# Altium footprint library WR-MJ.PcbLib: 84 footprints (part 3 of 6)
Each footprint in its own frame and in the unit in brackets; x right, y up, seen from the top. Pads: shape width x height; smd on the part's side, far side on the other; paste and mask are expansions set on the pad; w line width, h text height; cw(c..) or ccw(c..) is an arc to the next point about the centre after c.
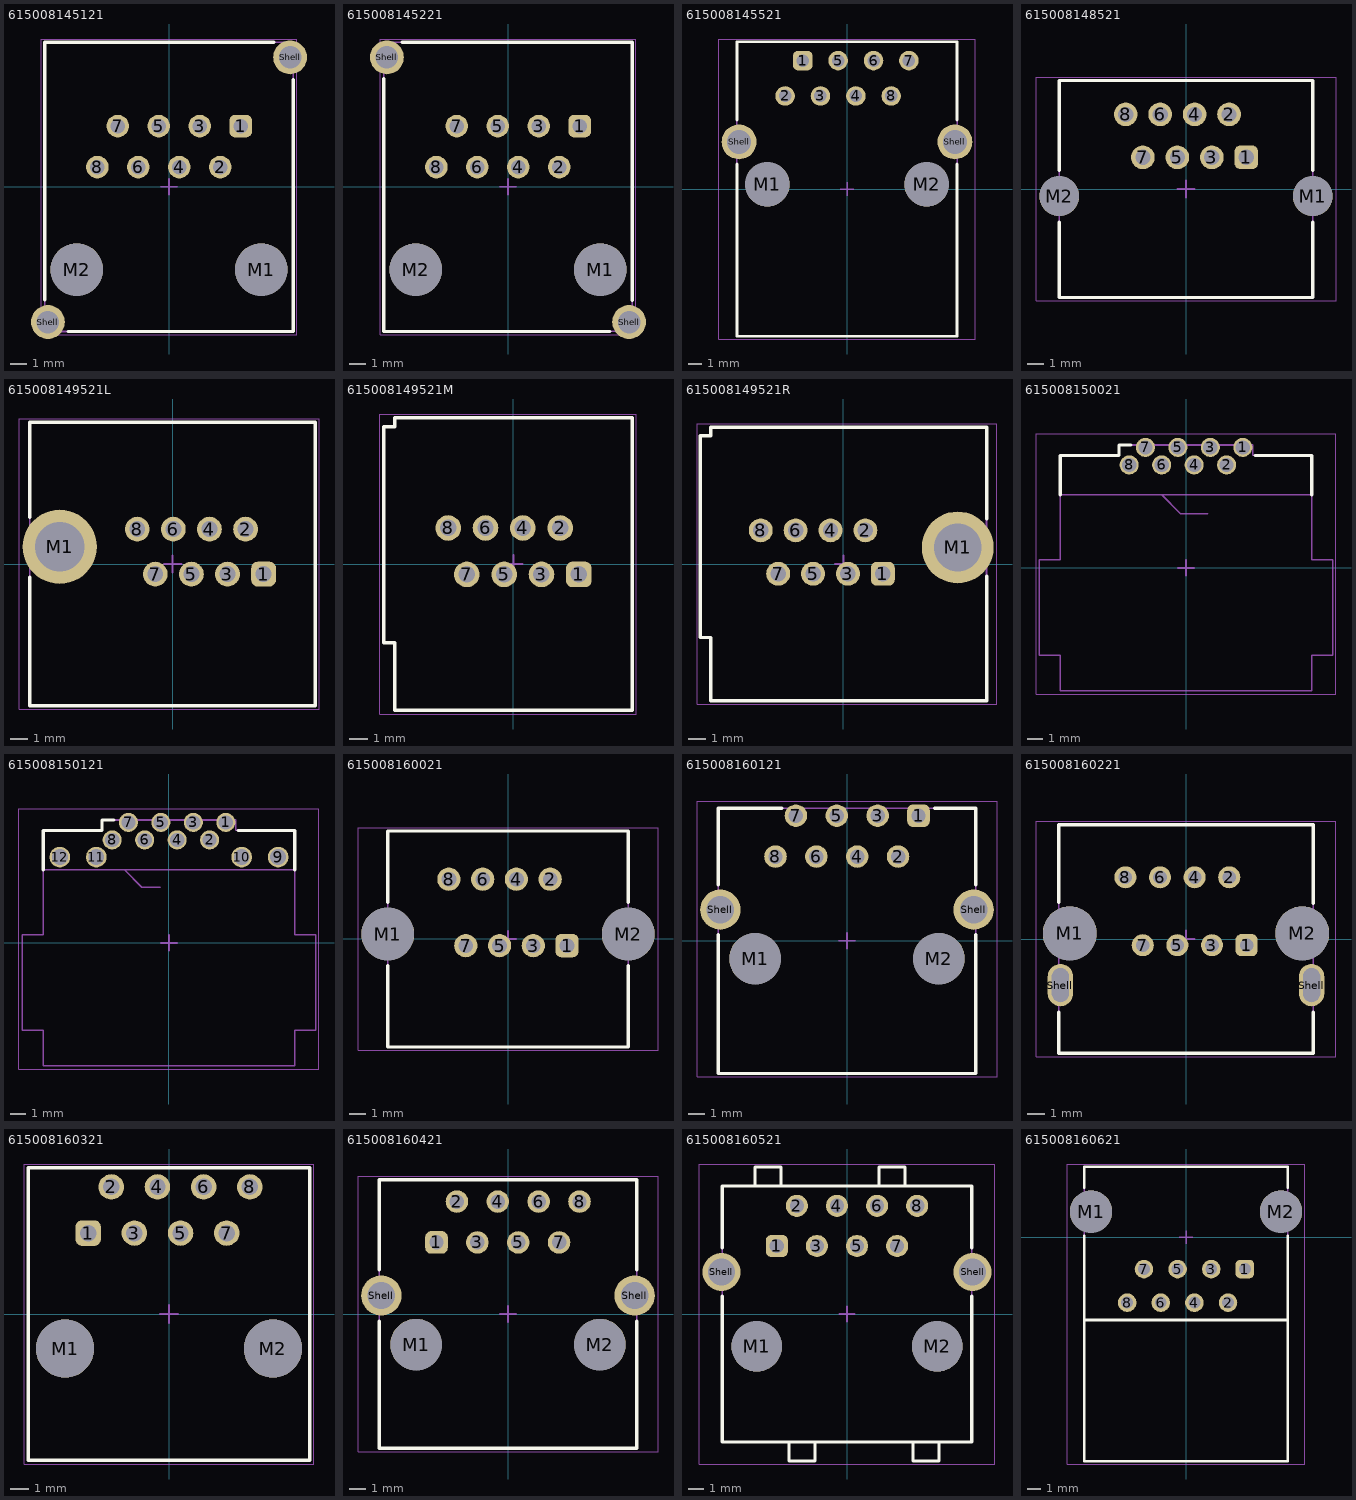
[diagram p2: the footprints below, top view; thin cyan lines are the x and y axes]

## 615008145121 [mm] "Modular Jack 45deg Entry Shielded 8P8C Standard & Reverse Metal Post Trail"
height 20.9
pads (12):
  rrect50% 1.4x1.4 hole 0.9: 1(4.44,3.765)
  round 1.4 hole 0.9: 2(3.175,1.225) 3(1.905,3.765) 4(0.635,1.225) 5(-0.635,3.765) 6(-1.905,1.225) 7(-3.175,3.765) 8(-4.44,1.225)
  round 3.25 hole 3.25 unplated: M1(5.715,-5.125) M2(-5.715,-5.125)
  round 2.1 hole 1.4: Shell(-7.5,-8.375) Shell(7.5,8.025)
Top Overlay:
  lines w0.2: -7.7,-7 -7.7,8.96 6.5,8.96 ; -6.25,-8.959 7.7,-8.959 7.7,6.65
Top Assembly:
  lines w0.1: -7.7,-8.959 7.7,-8.959 7.7,8.96 -7.7,8.96 -7.7,-8.959
Top Designator:
  text ".Designator" at -3.647,-0.357 h1
Top Courtyard:
  lines w0.05: -7.9,-9.159 7.9,-9.159 7.9,9.159 -7.9,9.159 -7.9,-9.159
Top Component Center:
  lines w0.1: -0.5,0 0.5,0 ; 0,-0.5 0,0.5
3D body "615008145121.stp": height 21.52, standoff -3.58, extent -7.7,-8.959 7.7,8.96

## 615008145221 [mm] "Modular Jack 45deg Entry Shielded 8P8C Standard & Reverse Metal Post Trail"
height 20.9
pads (12):
  rrect50% 1.4x1.4 hole 0.9: 1(4.44,3.762)
  round 1.4 hole 0.9: 2(3.175,1.222) 3(1.905,3.762) 4(0.635,1.222) 5(-0.635,3.762) 6(-1.905,1.222) 7(-3.175,3.762) 8(-4.44,1.222)
  round 3.25 hole 3.25 unplated: M1(5.715,-5.128) M2(-5.715,-5.128)
  round 2.1 hole 1.4: Shell(-7.5,8.022) Shell(7.5,-8.378)
Top Overlay:
  lines w0.2: -7.7,6.7 -7.7,-8.962 6.3,-8.962 ; -6.55,8.957 7.7,8.957 7.7,-7.05
Top Assembly:
  lines w0.1: -7.7,-8.957 7.7,-8.957 7.7,8.957 -7.7,8.957 -7.7,-8.957
Top Designator:
  text ".Designator" at -3.647,-0.357 h1
Top Courtyard:
  lines w0.05: -7.9,-9.157 7.9,-9.157 7.9,9.157 -7.9,9.157 -7.9,-9.157
Top Component Center:
  lines w0.1: -0.5,0 0.5,0 ; 0,-0.5 0,0.5
3D body "615008145221.stp": height 21.52, standoff -3.58, extent -7.7,-8.957 7.7,8.957

## 615008145521 [mm] "Modular Jack Horizontal Shielded with EMI Panel Finger 8P8C CAT 5e Tab Down"
height 13.6
pads (12):
  rrect50% 1.4x1.4 hole 0.9: 1(-3.175,9.22)
  round 1.4 hole 0.9: 2(-4.445,6.68) 3(-1.905,6.68) 4(0.635,6.68) 5(-0.635,9.22) 6(1.905,9.22) 7(4.445,9.22) 8(3.175,6.68)
  round 3.2 hole 3.2 unplated: M1(-5.715,0.33) M2(5.715,0.33)
  round 2.5 hole 1.7: Shell(-7.75,3.38) Shell(7.75,3.38)
Top Overlay:
  lines w0.2: -7.9,1.8 -7.9,-10.57 7.9,-10.57 7.9,1.8 ; -7.9,4.95 -7.9,10.57 7.9,10.57 7.9,4.95
Top Assembly:
  lines w0.1: -7.9,-10.57 7.9,-10.57 7.9,10.57 -7.9,10.57 -7.9,-10.57
Top Designator:
  text ".Designator" at -3.647,-0.357 h1
Top Courtyard:
  lines w0.05: -9.2,-10.77 -9.2,10.77 9.2,10.77 9.2,-10.77 -9.2,-10.77
Top Component Center:
  lines w0.1: -0.5,0 0.5,0 ; 0,-0.5 0,0.5
3D body "615008145521 (rev1).stp": height 15.85, standoff -3.3, extent -7.9,-10.57 7.9,10.57

## 615008148521 [mm] "Modular Jack Horizontal Plastic 8P8C Tab Up"
height 14.5
pads (10):
  rrect50% 1.4x1.4 hole 0.9: 1(3.57,1.875)
  round 1.4 hole 0.9: 2(2.55,4.415) 3(1.53,1.875) 4(0.51,4.415) 5(-0.51,1.875) 6(-1.53,4.415) 7(-2.55,1.875) 8(-3.57,4.415)
  round 2.36 hole 2.36 unplated: M1(7.5,-0.425) M2(-7.5,-0.425)
Top Overlay:
  lines w0.2: -7.5,-1.95 -7.5,-6.425 7.5,-6.425 7.5,-1.95 ; -7.5,1.1 -7.5,6.425 7.5,6.425 7.5,1.1
Top Assembly:
  lines w0.1: -7.5,-6.425 -7.5,6.425 7.5,6.425 7.5,-6.425 -7.5,-6.425
Top Designator:
  text ".Designator" at -3.647,-0.357 h1
Top Courtyard:
  lines w0.05: -8.88,-6.625 8.88,-6.625 8.88,6.625 -8.88,6.625 -8.88,-6.625
Top Component Center:
  lines w0.1: -0.5,0 0.5,0 ; 0,-0.5 0,0.5
3D body "615008148521.stp": height 14.55, standoff -3.25, extent -8.75,-6.425 8.75,6.425

## 615008149521L [mm] "Modular Jack Horizontal Plastic 8P8C Assembly Tab Up"
height 15.4
pads (9):
  rrect50% 1.4x1.4 hole 0.9: 1(5.14,-0.57)
  round 1.4 hole 0.9: 2(4.12,1.97) 3(3.1,-0.57) 4(2.08,1.97) 5(1.06,-0.57) 6(0.04,1.97) 7(-0.98,-0.57) 8(-2,1.97)
  round 4.2 hole 2.8: M1(-6.38,0.97)
Top Overlay:
  lines w0.2: -8.07,-0.75 -8.07,-8 8.07,-8 8.07,8 -8.07,8 -8.07,2.65
Top Assembly:
  lines w0.1: -8.07,-8 -8.07,8 8.07,8 8.07,-8 -8.07,-8
Top Designator:
  text ".Designator" at -3.647,-0.357 h1
Top Courtyard:
  lines w0.05: -8.68,-8.2 -8.68,8.2 8.27,8.2 8.27,-8.2 -8.68,-8.2
Top Component Center:
  lines w0.1: -0.5,0 0.5,0 ; 0,-0.5 0,0.5
3D body "615008149521L.stp": height 15.5, standoff -3.98, extent -8.07,-8 8.07,8

## 615008149521M [mm] "Modular Jack Horizontal Plastic 8P8C Assembly Tab Up"
height 15.4
pads (8):
  rrect50% 1.4x1.4 hole 0.9: 1(3.57,-0.57)
  round 1.4 hole 0.9: 2(2.55,1.97) 3(1.53,-0.57) 4(0.51,1.97) 5(-0.51,-0.57) 6(-1.53,1.97) 7(-2.55,-0.57) 8(-3.57,1.97)
Top Overlay:
  lines w0.2: -7.1,-4.3 -6.5,-4.3 -6.5,-8 6.5,-8 6.5,8 -6.5,8 -6.5,7.5 -7.1,7.5 -7.1,-4.3
Top Assembly:
  lines w0.1: -7.1,-4.3 -7.1,7.5 -6.5,7.5 -6.5,8 6.5,8 6.5,-8 -6.5,-8 -6.5,-4.3 -7.1,-4.3
Top Designator:
  text ".Designator" at -3.647,-0.357 h1
Top Courtyard:
  lines w0.05: -7.3,-8.2 -7.3,8.2 6.7,8.2 6.7,-8.2 -7.3,-8.2
Top Component Center:
  lines w0.1: -0.5,0 0.5,0 ; 0,-0.5 0,0.5
3D body "615008149521M.stp": height 15.5, standoff -3.19, extent -7.1,-8 6.5,8

## 615008149521R [mm] "Modular Jack Horizontal Plastic 8P8C Assembly Tab Up"
height 15.4
pads (9):
  rrect50% 1.4x1.4 hole 0.9: 1(2.3,-0.57)
  round 1.4 hole 0.9: 2(1.28,1.97) 3(0.26,-0.57) 4(-0.76,1.97) 5(-1.78,-0.57) 6(-2.8,1.97) 7(-3.82,-0.57) 8(-4.84,1.97)
  round 4.2 hole 2.8: M1(6.68,0.97)
Top Overlay:
  lines w0.2: 8.37,-0.7 8.37,-8 -7.77,-8 -7.77,-4.3 -8.37,-4.3 -8.37,7.5 -7.77,7.5 -7.77,8 8.37,8 8.37,2.65
Top Assembly:
  lines w0.1: -8.37,-4.3 -8.37,7.5 -7.77,7.5 -7.77,8 8.37,8 8.37,-8 -7.77,-8 -7.77,-4.3 -8.37,-4.3
Top Designator:
  text ".Designator" at -3.647,-0.357 h1
Top Courtyard:
  lines w0.05: -8.57,-8.2 -8.57,8.2 8.98,8.2 8.98,-8.2 -8.57,-8.2
Top Component Center:
  lines w0.1: -0.5,0 0.5,0 ; 0,-0.5 0,0.5
3D body "615008149521R.stp": height 15.5, standoff -3.98, extent -8.37,-8 8.37,8

## 615008150021 [mm] "Horizontal Mid-Mount Plastic_1x1 - THT"
height 11.2
pads (8):
  round 1.2 hole 0.9: 1(3.57,7.575) 2(2.55,6.475) 3(1.53,7.575) 4(0.51,6.475) 5(-0.51,7.575) 6(-1.53,6.475) 7(-2.55,7.575) 8(-3.57,6.475)
Top Overlay:
  lines w0.2: -7.9,4.595 -7.9,7.075 -4.2,7.075 -4.2,7.725 -3.45,7.725 ; 4.35,7.075 7.9,7.075 7.9,4.595
Assembly Notes:
  lines w0.1: -7.9,4.595 7.9,4.595 ; -1.53,4.595 -0.355,3.42 1.37,3.42
  text "PCB End" at 1.67,2.92 h1
Top Assembly:
  lines w0.1: -9.225,-5.475 -9.225,0.525 -7.9,0.525 -7.9,7.075 -4.2,7.075 -4.2,7.725 4.2,7.725 4.2,7.075 7.9,7.075 7.9,0.525 9.225,0.525 9.225,-5.475 7.9,-5.475 7.9,-7.725 -7.9,-7.725 -7.9,-5.475 -9.225,-5.475
Top Designator:
  text ".Designator" at -3.647,-0.357 h1
Top Courtyard:
  lines w0.05: -9.425,-7.925 -9.425,8.425 9.425,8.425 9.425,-7.925 -9.425,-7.925
Top Component Center:
  lines w0.1: -0.5,0 0.5,0 ; 0,-0.5 0,0.5
3D body "615008150021.stp": height 8.17, standoff -2.83, extent -9.225,-7.725 9.225,7.725

## 615008150121 [mm] "THT 8P8C with Led"
height 11.2
pads (12):
  round 1.2 hole 0.9: 1(3.57,7.575) 2(2.55,6.475) 3(1.53,7.575) 4(0.51,6.475) 5(-0.51,7.575) 6(-1.53,6.475) 7(-2.55,7.575) 8(-3.57,6.475)
  round 1.3 hole 1: 9(6.86,5.395) 10(4.57,5.395) 11(-4.57,5.395) 12(-6.86,5.395)
Top Overlay:
  lines w0.2: -7.9,4.595 -7.9,7.075 -4.2,7.075 -4.2,7.725 -3.45,7.725 ; 4.35,7.075 7.9,7.075 7.9,4.595
Assembly Notes:
  lines w0.1: -7.9,4.595 7.9,4.595 ; -2.8,4.595 -1.705,3.5 -0.55,3.5
  text "PCB End" at -0.35,2.95 h1
Top Assembly:
  lines w0.1: -9.225,-5.475 -7.9,-5.475 -7.9,-7.725 7.9,-7.725 7.9,-5.475 9.225,-5.475 9.225,0.525 7.9,0.525 7.9,7.075 4.2,7.075 4.2,7.725 -4.2,7.725 -4.2,7.075 -7.9,7.075 -7.9,0.525 -9.225,0.525 -9.225,-5.475
Top Designator:
  text ".Designator" at -3.647,-0.357 h1
Top Courtyard:
  lines w0.05: -9.425,-7.925 9.425,-7.925 9.425,8.425 -9.425,8.425 -9.425,-7.925
Top Component Center:
  lines w0.1: -0.5,0 0.5,0 ; 0,-0.5 0,0.5
3D body "615008150121.stp": height 8.17, standoff -2.83, extent -9.225,-7.725 9.225,7.725

## 615008160021 [mm] "Modular Jack THT"
height 14.48
pads (10):
  rrect50% 1.4x1.4 hole 0.89: 1(3.555,-0.4)
  round 1.4 hole 0.89: 2(2.539,3.6) 3(1.523,-0.4) 4(0.507,3.6) 5(-0.509,-0.4) 6(-1.525,3.6) 7(-2.541,-0.4) 8(-3.557,3.6)
  round 3.18 hole 3.18 unplated: M1(-7.24,0.3) M2(7.24,0.3)
Top Overlay:
  lines w0.2: -7.24,-1.6 -7.24,-6.5 7.24,-6.5 7.24,-1.6 ; -7.24,2.2 -7.24,6.5 7.24,6.5 7.24,2.2
Top Assembly:
  lines w0.1: -7.24,-6.5 -7.24,6.5 7.24,6.5 7.24,-6.5 -7.24,-6.5
Top Designator:
  text ".Designator" at -3.647,-0.357 h1
Top Courtyard:
  lines w0.05: -9.03,-6.7 -9.03,6.7 9.03,6.7 9.03,-6.7 -9.03,-6.7
Top Component Center:
  lines w0.1: -0.5,0 0.5,0 ; 0,-0.5 0,0.5
3D body "615008160021.stp": height 14.56, standoff -3.17, extent -7.241,-6.5 7.241,6.5

## 615008160121 [mm] "Modular Jack THT"
height 16.4
pads (12):
  rrect50% 1.4x1.4 hole 0.9: 1(4.445,7.78)
  round 1.4 hole 0.9: 2(3.175,5.24) 3(1.905,7.78) 4(0.635,5.24) 5(-0.635,7.78) 6(-1.905,5.24) 7(-3.175,7.78) 8(-4.445,5.24)
  round 3.2 hole 3.2 unplated: M1(-5.715,-1.11) M2(5.715,-1.11)
  round 2.5 hole 1.7: Shell(-7.875,1.94) Shell(7.875,1.94)
Top Overlay:
  lines w0.2: -8,0.39 -8,-8.25 8,-8.25 8,0.39 ; -8,3.49 -8,8.25 -4.05,8.25 ; 5.45,8.25 8,8.25 8,3.49
Top Assembly:
  lines w0.1: -8,-8.25 8,-8.25 8,8.25 -8,8.25 -8,-8.25
Top Designator:
  text ".Designator" at -3.647,-0.357 h1
Top Courtyard:
  lines w0.05: -9.325,-8.45 -9.325,8.68 9.325,8.68 9.325,-8.45 -9.325,-8.45
Top Component Center:
  lines w0.1: -0.5,0 0.5,0 ; 0,-0.5 0,0.5
3D body "615008160121.stp": height 16.56, standoff -3.14, extent -8.12,-8.25 8.12,8.25

## 615008160221 [mm] "Modular Jack THT Horizontal Shielded"
height 14.7
pads (12):
  rrect50% 1.3x1.3 hole 0.8: 1(3.57,-0.365)
  round 1.3 hole 0.8: 2(2.55,3.635) 3(1.53,-0.365) 4(0.51,3.635) 5(-0.51,-0.365) 6(-1.53,3.635) 7(-2.55,-0.365) 8(-3.57,3.635)
  round 3.18 hole 3.18 unplated: M1(-6.85,0.335) M2(6.85,0.335)
  oval 1.5x2.5 hole 1 slot 2 at 90 deg: Shell(-7.4,-2.715) Shell(7.4,-2.715)
Top Overlay:
  lines w0.2: -7.5,-4.3 -7.5,-6.725 7.5,-6.725 7.5,-4.3 ; -7.5,2.15 -7.5,6.725 7.5,6.725 7.5,2.1
Top Assembly:
  lines w0.1: -7.5,-6.725 -7.5,6.725 7.5,6.725 7.5,-6.725 -7.5,-6.725
Top Designator:
  text ".Designator" at -3.647,-0.357 h1
Top Courtyard:
  lines w0.05: -8.838,-6.925 8.838,-6.925 8.838,6.925 -8.838,6.925 -8.838,-6.925
Top Component Center:
  lines w0.1: -0.5,0 0.5,0 ; 0,-0.5 0,0.5
3D body "615008160221.stp": height 15.9, standoff -3.19, extent -8.638,-6.725 8.638,6.725

## 615008160321 [mm] "Modular Jack THT Vertical Plastic"
height 16.2
pads (10):
  rrect50% 1.4x1.4 hole 0.9: 1(-4.445,4.45)
  round 1.4 hole 0.9: 2(-3.175,6.99) 3(-1.905,4.45) 4(-0.635,6.99) 5(0.635,4.45) 6(1.905,6.99) 7(3.175,4.45) 8(4.445,6.99)
  round 3.2 hole 3.2 unplated: M1(-5.715,-1.9) M2(5.715,-1.9)
Top Overlay:
  lines w0.2: -7.75,-8.05 7.75,-8.05 7.75,8.05 -7.75,8.05 -7.75,-8.05
Top Assembly:
  lines w0.1: -7.75,-8.05 -7.75,8.05 7.75,8.05 7.75,-8.05 -7.75,-8.05
Top Designator:
  text ".Designator" at -3.647,-0.357 h1
Top Courtyard:
  lines w0.05: -7.95,-8.25 -7.95,8.25 7.95,8.25 7.95,-8.25 -7.95,-8.25
Top Component Center:
  lines w0.1: -0.5,0 0.5,0 ; 0,-0.5 0,0.5
3D body "615008160321.stp": height 16.33, standoff -3.23, extent -7.75,-8.05 7.75,8.06

## 615008160421 [mm] "Modular Jack THT Vertical Shielded"
height 16.5
pads (12):
  rrect50% 1.4x1.4 hole 0.9: 1(-4.445,4.45)
  round 1.4 hole 0.9: 2(-3.175,6.99) 3(-1.905,4.45) 4(-0.635,6.99) 5(0.635,4.45) 6(1.905,6.99) 7(3.175,4.45) 8(4.445,6.99)
  round 3.2 hole 3.2 unplated: M1(-5.715,-1.9) M2(5.715,-1.9)
  round 2.5 hole 1.7: Shell(-7.875,1.15) Shell(7.875,1.15)
Top Overlay:
  lines w0.2: -8,-0.45 -8,-8.35 8,-8.35 8,-0.45 ; -8,2.75 -8,8.35 8,8.35 8,2.75
Top Assembly:
  lines w0.1: -8,-8.35 8,-8.35 8,8.35 -8,8.35 -8,-8.35
Top Designator:
  text ".Designator" at -3.647,-0.357 h1
Top Courtyard:
  lines w0.05: -9.325,-8.55 9.325,-8.55 9.325,8.55 -9.325,8.55 -9.325,-8.55
Top Component Center:
  lines w0.1: -0.5,0 0.5,0 ; 0,-0.5 0,0.5
3D body "615008160421.stp": height 16.5, standoff -3.5, extent -8,-8.35 8,8.35

## 615008160521 [mm] "Modular Jack THT Vertical Shielded"
height 16.5
pads (12):
  rrect50% 1.4x1.4 hole 0.9: 1(-4.445,4.31)
  round 1.4 hole 0.9: 2(-3.175,6.85) 3(-1.905,4.31) 4(-0.635,6.85) 5(0.635,4.31) 6(1.905,6.85) 7(3.175,4.31) 8(4.445,6.85)
  round 3.2 hole 3.2 unplated: M1(-5.715,-2.05) M2(5.715,-2.05)
  round 2.4 hole 1.7: Shell(-7.95,2.66) Shell(7.95,2.66)
Top Overlay:
  lines w0.2: -7.9,1.15 -7.9,-8.1 7.9,-8.1 7.9,1.15 ; -7.9,4.2 -7.9,8.1 7.9,8.1 7.9,4.2 ; -5.825,8.1 -5.825,9.3 -4.175,9.3 -4.175,8.1 ; -3.675,-8.1 -3.675,-9.3 -2.025,-9.3 -2.025,-8.1 ; 2.025,8.1 2.025,9.3 3.675,9.3 3.675,8.1 ; 4.175,-8.1 4.175,-9.3 5.825,-9.3 5.825,-8.1
Top Assembly:
  lines w0.1: -5.825,8.1 -5.825,9.3 -4.175,9.3 -4.175,8.1 ; -3.675,-8.1 -3.675,-9.3 -2.025,-9.3 -2.025,-8.1 ; 2.025,8.1 2.025,9.3 3.675,9.3 3.675,8.1 ; 4.175,-8.1 4.175,-9.3 5.825,-9.3 5.825,-8.1 ; -7.9,-8.1 7.9,-8.1 7.9,8.1 -7.9,8.1 -7.9,-8.1
Top Designator:
  text ".Designator" at -3.647,-0.357 h1
Top Courtyard:
  lines w0.05: -9.35,-9.5 9.35,-9.5 9.35,9.5 -9.35,9.5 -9.35,-9.5
Top Component Center:
  lines w0.1: -0.5,0 0.5,0 ; 0,-0.5 0,0.5
3D body "615008160521.stp": height 16.9, standoff -2.6, extent -8.12,-9.3 8.12,9.298

## 615008160621 [mm] "Modular Jack THT 47.5deg Plastic"
height 16.1
pads (10):
  rrect50% 1.4x1.4 hole 0.9: 1(4.445,-2.4)
  round 1.4 hole 0.9: 2(3.175,-4.94) 3(1.905,-2.4) 4(0.635,-4.94) 5(-0.635,-2.4) 6(-1.905,-4.94) 7(-3.175,-2.4) 8(-4.445,-4.94)
  round 3.2 hole 3.2 unplated: M1(-7.175,1.94) M2(7.175,1.94)
Top Overlay:
  lines w0.2: -7.7,-6.25 7.7,-6.25 ; -7.7,0.13 -7.7,-16.93 7.7,-16.93 7.7,0.13 ; -7.7,3.75 -7.7,5.34 7.7,5.34 7.7,3.75
Top Assembly:
  lines w0.1: -7.7,-6.25 7.7,-6.25 ; -7.7,-16.93 -7.7,5.34 7.7,5.34 7.7,-16.93 -7.7,-16.93
Top Designator:
  text ".Designator" at -3.647,-0.357 h1
Top Courtyard:
  lines w0.05: -8.975,-17.13 8.975,-17.13 8.975,5.54 -8.975,5.54 -8.975,-17.13
Top Component Center:
  lines w0.1: -0.5,0 0.5,0 ; 0,-0.5 0,0.5
3D body "615008160621.stp": height 22.69, standoff -3.09, extent -7.725,-16.93 7.725,5.434